# Altium footprint library 24位ad小板子.PcbLib: 14 footprints
Each footprint in its own frame and in the unit in brackets; x right, y up, seen from the top. Pads: shape width x height; smd on the part's side, far side on the other; paste and mask are expansions set on the pad; w line width, h text height; cw(c..) or ccw(c..) is an arc to the next point about the centre after c.
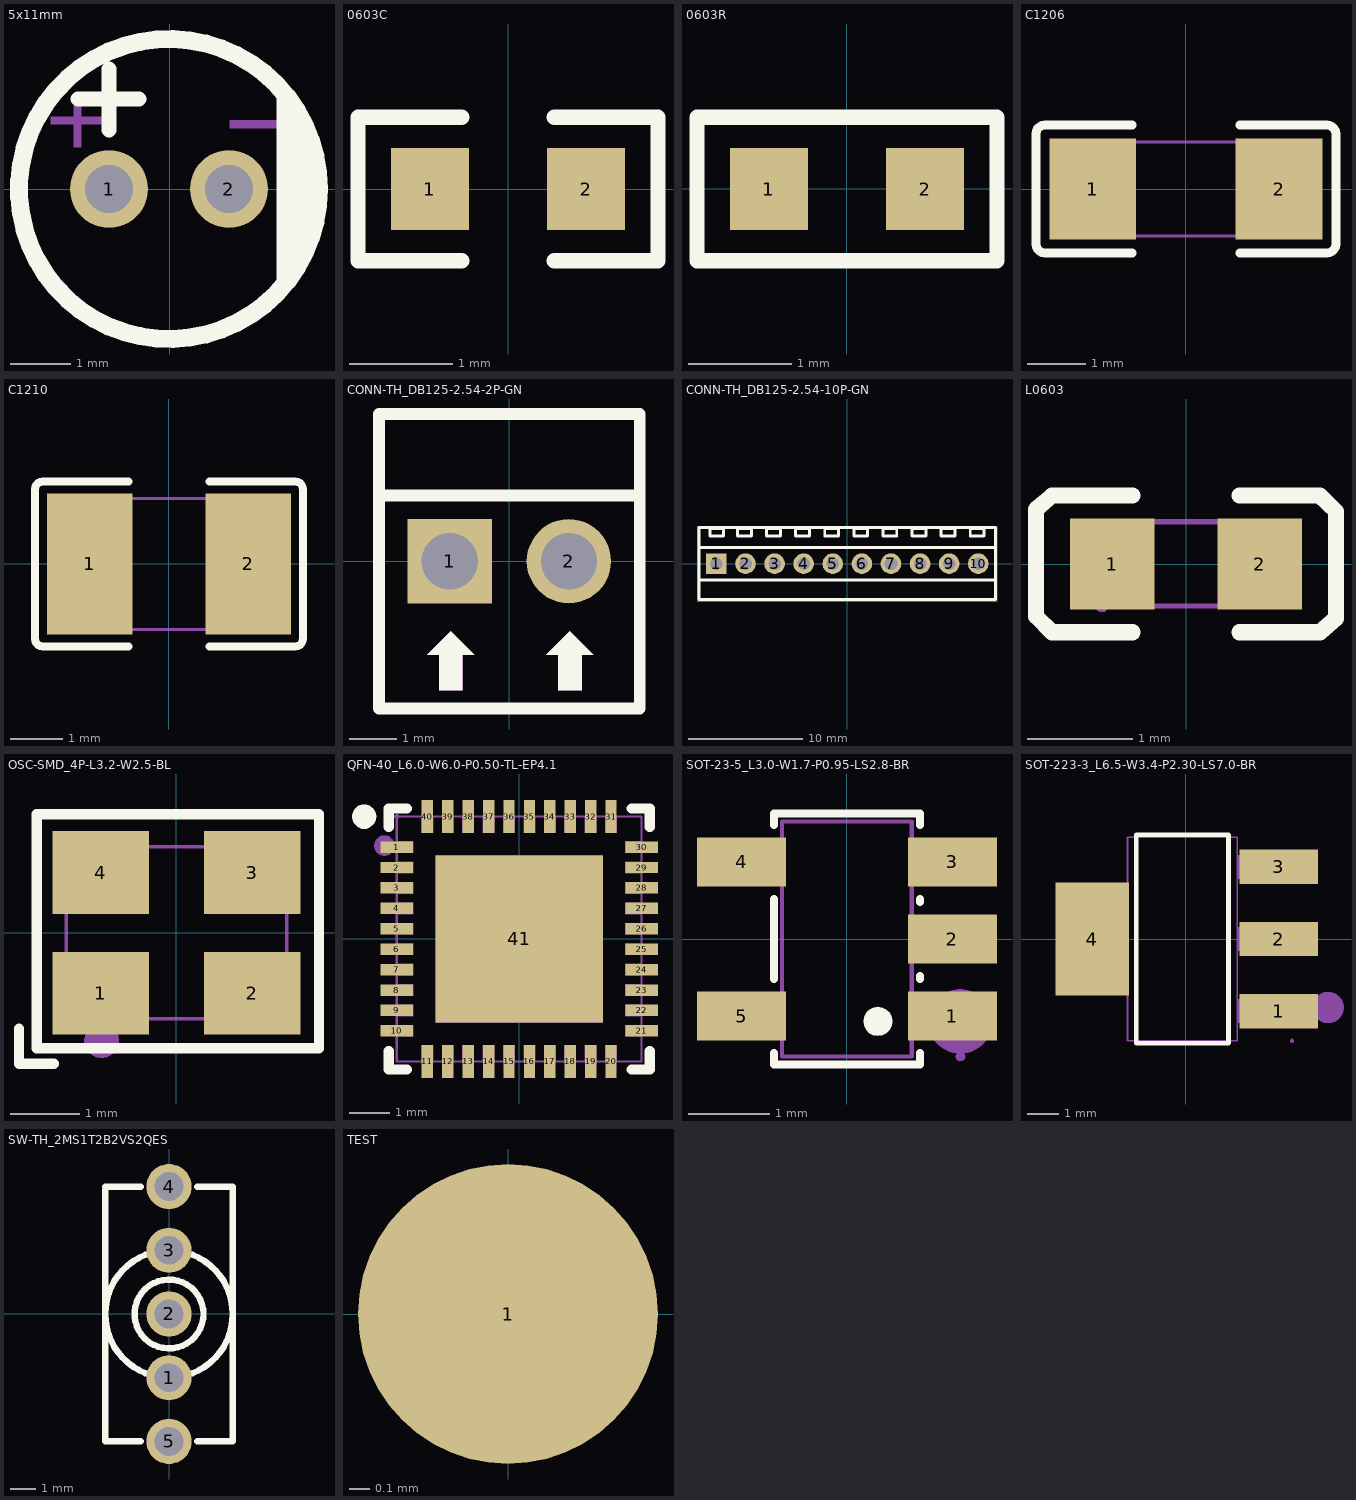
[diagram p0: the footprints below, top view; thin cyan lines are the x and y axes]

## 5x11mm [mm]
height 5.85
pads (2):
  round 1.3 hole 0.8: 1(-1.016,0) 2(0.984,0)
Top Overlay:
  circle w0.3: c-0.016,0 r2.5
  region: 1.778,1.651 1.945,1.491 2.209,1.111 2.391,0.685 2.484,0.231 2.484,-0.231 2.391,-0.685 2.209,-1.111 1.945,-1.491 1.778,-1.651
  lines w0.254: -1.532,1.5 -0.516,1.5 ; -1.016,0.984 -1.016,2
Mechanical 15:
  region: 1,1.143 1.889,1.143 1.889,1.016 1,1.016
  region: -1.604,0.698 -1.604,1.587 -1.477,1.587 -1.476,0.698
  region: -1.985,1.206 -1.096,1.206 -1.096,1.079 -1.985,1.079

## 0603C [mm]
pads (2):
  rect 0.76x0.8 smd: 1(-0.76,0) 2(0.76,0)
Top Overlay:
  lines w0.15: -0.45,-0.7 -1.46,-0.7 -1.46,0.7 -0.45,0.7 ; 0.45,-0.7 1.46,-0.7 1.46,0.7 0.45,0.7

## 0603R [mm]
pads (2):
  rect 0.76x0.8 smd: 1(-0.76,0) 2(0.76,0)
Top Overlay:
  lines w0.15: -1.46,-0.7 -1.46,0.7 1.46,0.7 1.46,-0.7 -1.46,-0.7

## C1206 [mil]
pads (2):
  rect 58.5x68 smd paste-3937 mask+2: 1(-62.7,0) 2(62.7,0)
Top Overlay:
  lines w6: -36.4,-43 -94.9,-43 -96.8,-42.7 -98.4,-41.9 -99.8,-40.5 -100.6,-38.9 -100.9,-37 -100.9,37 -100.6,38.9 -99.8,40.6 -98.4,41.9 -96.8,42.7 -94.9,43 -36.4,43 ; 36.5,-43 95,-43 96.8,-42.7 98.5,-41.9 99.8,-40.5 100.7,-38.9 101,-37 101,37 100.7,38.9 99.8,40.6 98.5,41.9 96.8,42.7 95,43 36.5,43
Top Paste:
  region: 33.5,-30.1 33.5,-15.5 37.4,-11.5 49.4,-11.5 53.4,-7.6 53.4,7.6 49.4,11.6 37.4,11.6 33.5,15.5 33.5,30.1 37.4,34 88,34 92,30.1 92,-30.1 88,-34 37.4,-34
  region: -33.4,-30.1 -33.4,-15.5 -37.4,-11.5 -49.4,-11.5 -53.3,-7.6 -53.3,7.6 -49.4,11.6 -37.4,11.6 -33.4,15.5 -33.4,30.1 -37.4,34 -88,34 -91.9,30.1 -91.9,-30.1 -88,-34 -37.4,-34
Mechanical 6:
  lines w2: -63,-31.5 -63,31.5 63,31.5 63,-31.5 -63,-31.5
Mechanical 8:
  region: -60.6,-31.5 -61,-32.8 -62,-33.6 -63.3,-33.8 -64.5,-33.3 -65.2,-32.1 -65.2,-30.8 -64.5,-29.7 -63.3,-29.1 -62,-29.3 -61,-30.2
Mechanical 9:
  region: -63,-31.5 -63,31.5 -43.3,31.5 -43.3,-31.5
  region: 63,-31.5 63,31.5 43.3,31.5 43.3,-31.5

## C1210 [mil]
pads (2):
  rect 64.4x106.3 smd paste-3937 mask+2: 1(-59.7,0) 2(59.8,0)
Top Overlay:
  lines w6: -30.5,-62.2 -94.9,-62.2 -96.8,-61.9 -98.4,-61.1 -99.8,-59.7 -100.6,-58.1 -100.9,-56.2 -100.9,56.1 -100.6,58 -99.8,59.6 -98.4,61 -96.8,61.8 -94.9,62.1 -30.5,62.1 ; 30.6,-62.2 95,-62.2 96.8,-61.9 98.5,-61.1 99.8,-59.7 100.7,-58.1 101,-56.2 101,56.1 100.7,58 99.8,59.6 98.5,61 96.8,61.8 95,62.1 30.6,62.1
Top Paste:
  region: 27.6,-49.3 27.6,-22.1 31.5,-18.1 45.5,-18.1 49.5,-14.2 49.5,14.1 45.5,18 31.5,18 27.6,22 27.6,49.2 31.5,53.1 88,53.1 92,49.2 92,-49.3 88,-53.2 31.5,-53.2
  region: -27.5,-49.3 -27.5,-22.1 -31.5,-18.1 -45.5,-18.1 -49.4,-14.2 -49.4,14.1 -45.5,18 -31.5,18 -27.5,22 -27.5,49.2 -31.5,53.1 -88,53.1 -91.9,49.2 -91.9,-49.3 -88,-53.2 -31.5,-53.2
Mechanical 6:
  lines w2: -63,-49.3 -63,49.2 63,49.2 63,-49.3 -63,-49.3
Mechanical 8:
  region: -60.6,-49.3 -61,-50.5 -62,-51.4 -63.3,-51.6 -64.5,-51 -65.2,-49.9 -65.2,-48.6 -64.5,-47.5 -63.3,-46.9 -62,-47.1 -61,-48
Mechanical 9:
  region: -63,-49.3 -63,49.2 -39.3,49.2 -39.3,-49.3
  region: 63,-49.3 63,49.2 39.4,49.2 39.4,-49.3

## CONN-TH_DB125-2.54-2P-GN [mil]
pads (2):
  rect 70.9x70.9 hole 47.2: 1(-50,0)
  round 70.9 hole 47.2: 2(50,0)
Top Overlay:
  region: 50.8,-59 31.1,-78.7 70.5,-78.7
  region: 41,-78.7 60.7,-78.7 60.7,-108.2 41,-108.2
  region: -49.2,-59 -68.9,-78.7 -29.5,-78.7
  region: -59,-78.7 -39.4,-78.7 -39.4,-108.2 -59,-108.2
  lines w10: -109.4,55 109.5,55 ; -109.4,-123.6 109.5,-123.6 109.5,123.6 -109.4,123.6 -109.4,-123.6
Mechanical 2:
  region: 41,-78.7 60.7,-78.7 60.7,-108.2 41,-108.2
  region: 50.8,-59 31.1,-78.7 70.5,-78.7
  region: -49.2,-59 -68.9,-78.7 -29.5,-78.7
  region: -59,-78.7 -39.3,-78.7 -39.3,-108.2 -59,-108.2
Mechanical 6:
  lines w2: -109.4,-125.9 109.5,-125.9 109.5,122.1 -109.4,122.1 -109.4,-125.9
Mechanical 8:
  region: -107.1,-125.9 -107.5,-127.2 -108.5,-128.1 -109.8,-128.3 -111,-127.7 -111.7,-126.6 -111.7,-125.3 -111,-124.2 -109.8,-123.6 -108.5,-123.8 -107.5,-124.7
Mechanical 9:
  region: 40.2,9.9 59.9,9.9 59.9,-9.8 40.2,-9.8
  region: -59.8,9.9 -40.1,9.9 -40.1,-9.8 -59.8,-9.8

## CONN-TH_DB125-2.54-10P-GN [mil]
pads (10):
  rect 70.9x70.9 hole 43.3: 1(-450,0)
  round 70.9 hole 43.3: 2(-350,0) 3(-250,0) 4(-150,0) 5(-50,0) 6(50,0) 7(150,0) 8(250,0) 9(350,0) 10(450,0)
Top Overlay:
  lines w10: -509.4,-56.8 509.5,-56.8 ; -509.4,54.9 509.5,54.9 ; -509.4,-123.6 -509.4,123.6 509.5,123.6 509.5,-123.6 -509.4,-123.6 ; -472.5,95 -425,95 -425,120 -472.5,120 -472.5,95 ; -377.5,95 -330,95 -330,120 -377.5,120 -377.5,95 ; -277.5,95 -230,95 -230,120 -277.5,120 -277.5,95 ; -177.5,95 -130,95 -130,120 -177.5,120 -177.5,95 ; -77.5,95 -30,95 -30,120 -77.5,120 -77.5,95 ; 22.5,95 70,95 70,120 22.5,120 22.5,95 ; 122.5,95 170,95 170,120 122.5,120 122.5,95 ; 222.5,95 270,95 270,120 222.5,120 222.5,95 ; 322.5,95 370,95 370,120 322.5,120 322.5,95 ; 422.5,95 470,95 470,120 422.5,120 422.5,95
Mechanical 3:
  lines w2: -514.4,-128.6 514.5,-128.6 514.5,128.6 -514.4,128.6 -514.4,-128.6
Mechanical 5:
  region: -512.1,-128.6 -512.5,-129.9 -513.5,-130.8 -514.8,-131 -516,-130.4 -516.7,-129.3 -516.7,-128 -516,-126.9 -514.8,-126.3 -513.5,-126.5 -512.5,-127.4
Mechanical 6:
  drawing of 10 lines, arcs and shapes, not listed

## L0603 [mil]
pads (2):
  rect 31.5x34 smd paste-3937 mask+2: 1(-27.6,0) 2(27.5,0)
Top Overlay:
  lines w6: -50.1,-25.5 -20.1,-25.5 ; -50.1,25.6 -20.1,25.6 ; -50,-25.6 -56.1,-19.6 -56.1,20.4 -50,25.6 ; 20,-25.5 50,-25.5 56,-20.3 56,19.7 50,25.6 20,25.6
Top Paste:
  region: -9.9,5.7 -9.9,-5.2 -20.7,-16.8 -40.5,-16.8 -43.1,-14.3 -43.1,14.7 -40.5,17.2 -20.7,17.2
  region: 10.4,6.1 10.4,-4.8 21.2,-16.3 41,-16.3 43.5,-13.8 43.5,15.2 41,17.7 21.2,17.7
Mechanical 6:
  lines w2: -31.5,-15.7 31.5,-15.7 31.5,15.8 -31.5,15.8 -31.5,-15.7
Mechanical 8:
  region: -29.2,-15.7 -29.5,-17 -30.5,-17.9 -31.9,-18 -33.1,-17.5 -33.8,-16.4 -33.8,-15 -33.1,-13.9 -31.9,-13.4 -30.5,-13.6 -29.5,-14.4
Mechanical 9:
  region: 31.5,-15.7 19.6,-15.7 19.6,15.8 31.5,15.8
  region: -19.7,-15.7 -31.5,-15.7 -31.5,15.8 -19.7,15.8

## OSC-SMD_4P-L3.2-W2.5-BL [mil]
pads (4):
  rect 55.1x47.2 smd: 1(-43.3,-34.5) 2(43.3,-34.5) 3(43.3,34.4) 4(-43.3,34.4)
Top Overlay:
  lines w6: -90,-55 -90,-75 -70,-75 ; -79.9,-66.1 81.5,-66.1 81.5,67.8 -79.9,67.8 -79.9,-66.1
Mechanical 2:
  region: -57.8,32.3 -32.8,32.3 -32.8,37.3 -57.8,37.3
  region: -47.5,47.5 -47.5,22.5 -42.5,22.5 -42.5,47.5
  region: -68.4,-21.1 -67,-21.1 -67,-23.9 -68.4,-23.9
  region: -67,-21.1 -65.6,-21.1 -65.6,-23.9 -67,-23.9
  region: -65.6,-19.7 -64.2,-19.7 -64.2,-23.9 -65.6,-23.9
  region: -64.2,-18.3 -62.8,-18.3 -62.8,-22.5 -64.2,-22.5
  region: -62.8,-18.3 -61.3,-18.3 -61.3,-39.5 -62.8,-39.5
  region: -61.3,-16.8 -59.9,-16.8 -59.9,-39.5 -61.3,-39.5
  region: -59.9,-16.8 -58.5,-16.8 -58.5,-39.5 -59.9,-39.5
  region: -58.5,-16.8 -57.1,-16.8 -57.1,-39.5 -58.5,-39.5
  lines w10: -47.8,-61.7 -47.4,-59.8 -46.4,-58.2 -44.7,-57.1 -42.8,-56.7 -40.9,-57.1 -39.3,-58.2 -38.2,-59.8 -37.8,-61.7 -38.2,-63.6 -39.3,-65.2 -40.9,-66.3 -42.8,-66.7 -44.7,-66.3 -46.4,-65.2 -47.4,-63.6 -47.8,-61.7
Mechanical 6:
  lines w2: -63,-49.2 63,-49.2 63,49.2 -63,49.2 -63,-49.2
Mechanical 8:
  region: -60.6,-49.2 -61,-50.5 -62,-51.4 -63.3,-51.6 -64.5,-51 -65.3,-49.9 -65.3,-48.5 -64.5,-47.4 -63.3,-46.9 -62,-47.1 -61,-47.9
Mechanical 9:
  region: 23.6,-17.7 59.1,-17.7 59.1,-49.2 23.6,-49.2
  region: -59.1,-17.7 -23.6,-17.7 -23.6,-49.2 -59.1,-49.2
  region: -59.1,49.2 -23.6,49.2 -23.6,17.7 -59.1,17.7
  region: 23.6,49.2 59.1,49.2 59.1,17.7 23.6,17.7

## QFN-40_L6.0-W6.0-P0.50-TL-EP4.1 [mil]
pads (41):
  rect 31.5x11 smd paste-3937 mask+2: 1(-118.1,88.5) 2(-118.1,68.9) 3(-118.1,49.2) 4(-118.1,29.5) 5(-118.1,9.8) 6(-118.1,-9.9) 7(-118.1,-29.6) 8(-118.1,-49.3) 9(-118.1,-68.9) 10(-118.1,-88.6) 21(118.1,-88.6) 22(118.1,-68.9) 23(118.1,-49.3) 24(118.1,-29.6) 25(118.1,-9.9) 26(118.1,9.8) 27(118.1,29.5) 28(118.1,49.2) 29(118.1,68.9) 30(118.1,88.5)
  rect 11x31.5 smd paste-3937 mask+2: 11(-88.6,-118.2) 12(-68.9,-118.2) 13(-49.2,-118.2) 14(-29.5,-118.2) 15(-9.8,-118.2) 16(9.9,-118.2) 17(29.5,-118.2) 18(49.2,-118.2) 19(68.9,-118.2) 20(88.6,-118.2) 31(88.6,118.1) 32(68.9,118.1) 33(49.2,118.1) 34(29.5,118.1) 35(9.9,118.1) 36(-9.8,118.1) 37(-29.5,118.1) 38(-49.2,118.1) 39(-68.9,118.1) 40(-88.6,118.1)
  rect 161.4x161.4 smd paste-3937 mask+2: 41(0,0)
Top Overlay:
  lines w10: -126,-108.3 -126,-126 -108.3,-126 ; -126,108.2 -126,125.9 -108.3,125.9 ; 108.3,-126 126,-126 126,-108.3 ; 108.3,125.9 126,125.9 126,108.2
  lines w11.8: -143.7,118 -144.1,115.9 -145.1,114.2 -146.7,112.9 -148.6,112.2 -150.6,112.2 -152.6,112.9 -154.1,114.2 -155.1,116 -155.5,118 -155.1,120 -154.1,121.8 -152.6,123.1 -150.6,123.8 -148.6,123.8 -146.7,123.1 -145.1,121.8 -144.1,120.1 -143.7,118.1
Top Paste:
  drawing of 41 lines, arcs and shapes, not listed
Mechanical 2:
  lines w10: -135,90 -134.6,91.9 -133.5,93.5 -131.9,94.6 -130,95 -128.1,94.6 -126.5,93.5 -125.4,91.9 -125,90 -125.4,88 -126.5,86.4 -128.1,85.3 -130,85 -131.9,85.3 -133.5,86.4 -134.6,88 -135,90
Mechanical 6:
  lines w2: -118.1,-118.2 118.1,-118.2 118.1,118.1 -118.1,118.1 -118.1,-118.2
Mechanical 8:
  region: -115.7,118.1 -116.1,116.8 -117.1,115.9 -118.4,115.7 -119.6,116.3 -120.4,117.4 -120.4,118.7 -119.6,119.9 -118.4,120.4 -117.1,120.2 -116.1,119.3
Mechanical 9:
  drawing of 41 lines, arcs and shapes, not listed

## SOT-23-5_L3.0-W1.7-P0.95-LS2.8-BR [mil]
pads (5):
  rect 43.3x23.6 smd: 1(51.2,-37.4) 2(51.2,0) 3(51.2,37.4) 4(-51.1,37.4) 5(-51.1,-37.4)
Top Overlay:
  region: 8.1,-40 8.4,-37.8 9.4,-35.8 10.9,-34.3 12.9,-33.3 15,-32.9 17.2,-33.3 19.2,-34.3 20.7,-35.8 21.7,-37.8 22,-40 21.7,-42.1 20.7,-44.1 19.2,-45.7 17.2,-46.7 15,-47 12.9,-46.7 10.9,-45.7 9.4,-44.1 8.4,-42.1 8.1,-40
  lines w3.9: -35.4,-55.3 -35.4,-61 35.5,-61 35.5,-55.3 ; -35.4,-19.5 -35.4,19.5 ; -35.4,55.3 -35.4,61 35.5,61 35.5,55.3 ; 35.5,-19.5 35.5,-17.9 ; 35.5,17.9 35.5,19.5
Mechanical 2:
  lines w15.7: 47.2,-40 47.6,-37.5 48.7,-35.3 50.4,-33.6 52.6,-32.5 55,-32.1 57.5,-32.5 59.7,-33.6 61.4,-35.3 62.5,-37.5 62.9,-40 62.5,-42.4 61.4,-44.6 59.7,-46.3 57.5,-47.5 55,-47.8 52.6,-47.5 50.4,-46.3 48.7,-44.6 47.6,-42.4 47.2,-40
Mechanical 6:
  lines w2: -31.5,-57.1 -31.5,57.1 31.5,57.1 31.5,-57.1 -31.5,-57.1
Mechanical 7:
  region: -37.8,-45.2 -37.8,-29.5 -31.1,-29.5 -31.1,-45.2
  region: -37.8,29.6 -37.8,45.3 -31.1,45.3 -31.1,29.6
  region: 31.1,29.6 31.1,45.3 37.8,45.3 37.8,29.6
  region: 31.1,-7.8 31.1,7.9 37.8,7.9 37.8,-7.8
  region: 31.1,-45.2 31.1,-29.5 37.8,-29.5 37.8,-45.2
Mechanical 8:
  region: 57.5,-57.1 57.1,-58.3 56.1,-59.2 54.8,-59.4 53.6,-58.8 52.9,-57.7 52.9,-56.4 53.6,-55.3 54.8,-54.7 56.1,-54.9 57.1,-55.8
Mechanical 9:
  region: -55.1,-45.2 -55.1,-29.5 -37.4,-29.5 -37.4,-45.2
  region: -55.1,29.6 -55.1,45.3 -37.4,45.3 -37.4,29.6
  region: 37.4,29.6 37.4,45.3 55.2,45.3 55.2,29.6
  region: 37.4,-7.8 37.4,7.9 55.2,7.9 55.2,-7.8
  region: 37.4,-45.2 37.4,-29.5 55.2,-29.5 55.2,-45.2

## SOT-223-3_L6.5-W3.4-P2.30-LS7.0-BR [mm]
height 0.35
pads (4):
  rect 2.5x1.1 smd: 1(2.97,-2.3) 2(2.97,0) 3(2.97,2.3)
  rect 2.34x3.6 smd: 4(-2.97,0)
Top Overlay:
  lines w0.152: -1.571,-3.326 1.371,-3.326 1.371,3.326 -1.571,3.326 -1.571,-3.326
Mechanical 6:
  circle w0.5: c4.552,-2.188 r0.25
Mechanical 15:
  region: 3.46,-3.25 3.46,-3.225 3.425,-3.19 3.375,-3.19 3.34,-3.225 3.34,-3.25 3.34,-3.275 3.375,-3.31 3.425,-3.31 3.46,-3.275
  region: -3.6,-1.5 -3.6,1.5 -2.85,1.5 -2.85,-1.5
  region: -2.86,-1.5 -2.86,1.5 -1.84,1.5 -1.84,-1.5
  region: 2.65,-2.675 2.65,-1.925 3.4,-1.925 3.4,-2.675
  region: 1.64,-2.675 1.64,-1.925 2.66,-1.925 2.66,-2.675
  region: 2.65,-0.375 2.65,0.375 3.4,0.375 3.4,-0.375
  region: 1.64,-0.375 1.64,0.375 2.66,0.375 2.66,-0.375
  region: 2.65,1.925 2.65,2.675 3.4,2.675 3.4,1.925
  region: 1.64,1.925 1.64,2.675 2.66,2.675 2.66,1.925
  lines w0.051: -1.85,-3.25 1.65,-3.25 1.65,3.25 -1.85,3.25 -1.85,-3.25

## SW-TH_2MS1T2B2VS2QES [mm]
height 0.35
pads (5):
  round 1.8 hole 1.15: 1(0,-2.54) 2(0,0) 3(0,2.54) 4(0,5.08) 5(0,-5.08)
Top Overlay:
  circle w0.254: c0,0 r2.541
  circle w0.254: c0,0 r1.374
  lines w0.254: -2.54,4.953 -2.54,-5.08 -1.131,-5.08 ; -2.54,5.08 -1.131,5.08 ; 1.131,-5.08 2.54,-5.08 2.54,5.08 1.131,5.08

## TEST [mm]
height 0.35
pads (1):
  round 1.5 smd: 1(0,0)